# Altium integrated library GRM21BR61H106KE43L.IntLib: 1 symbol
Pins are listed as number, name and electrical type; pins without a type are passive.

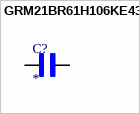
[diagram p0: symbol GRM21BR61H106KE43L]

## GRM21BR61H106KE43L
designator C?
SMD capacitor X5R(EIA) with capacitance 10uF Tol.10%. Rated voltage 50Vdc 85C; MF: Murata Electronics; MP: GRM21BR61H106KE43L; SnapEDA_Link: https://www.snapeda.com/parts/GRM21BR61H106KE43L/Murata/view-part/?ref=snap; Package: 2012 Murata; Value: *; Check_prices: https://www.snapeda.com/parts/GRM21BR61H106KE43L/Murata/view-part/?ref=eda
footprint CAPC2012X145N
pins: 1, 2